# Altium schematic symbol library Debugging Board V1.SCHLIB: 25 symbols
Pins are listed as number, name and electrical type; pins without a type are passive.

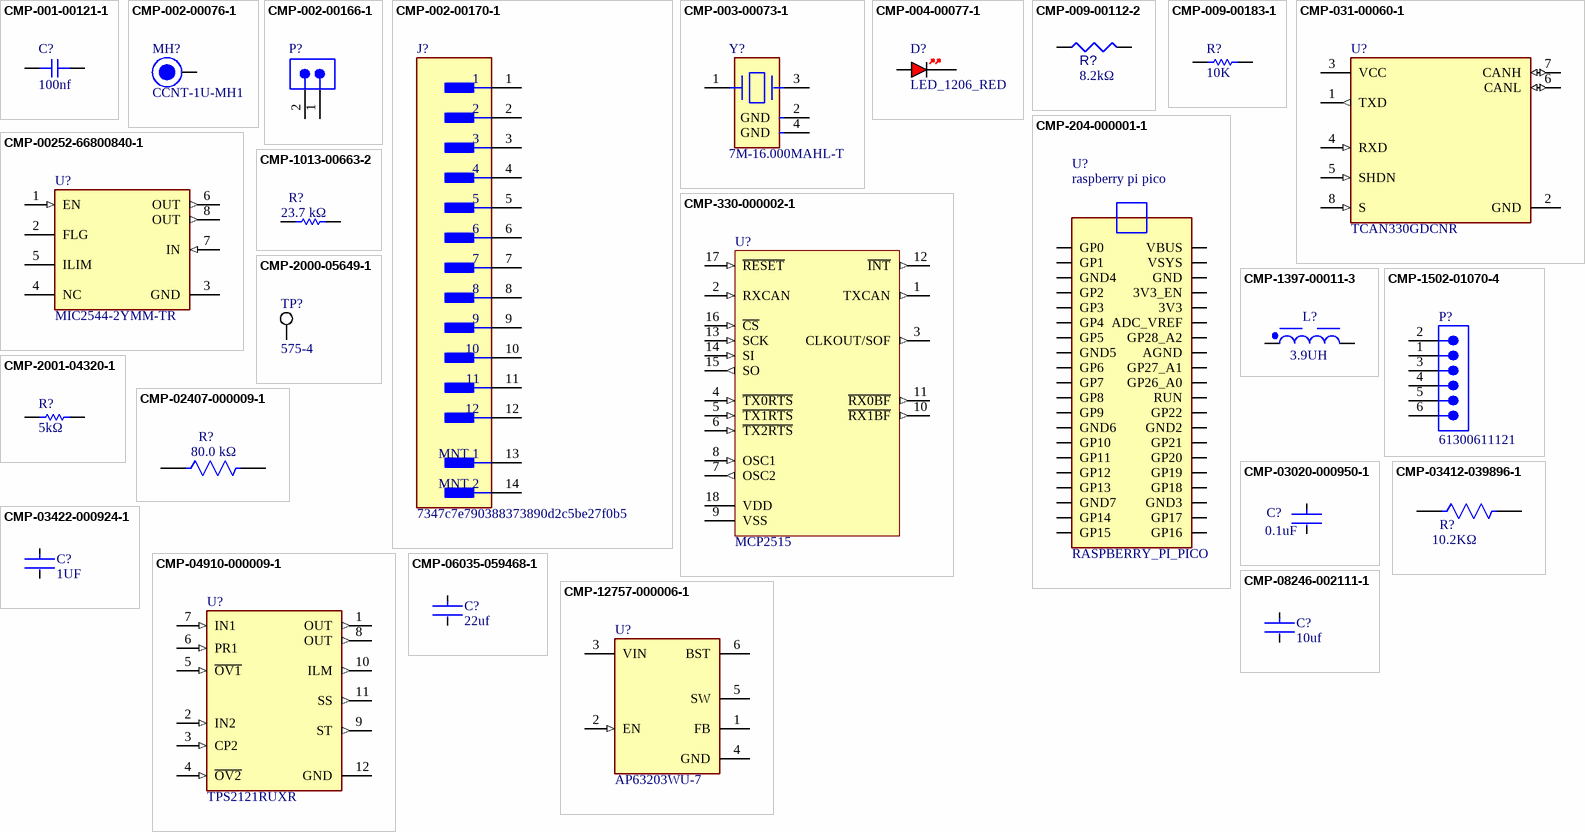
[diagram p0: symbols CMP-001-00121-1 to CMP-12757-000006-1]

## CMP-001-00121-1
designator C?, comment 100nf
Capacitor SMD 0805 - Generic; Source: Generic_Schematic_Library.SchLib; Design Item ID: CAP_0805; Component Type: Capacitors
footprint CAP_0805
pins: 1, 2

## CMP-002-00076-1
designator MH?, comment CCNT-1U-MH1
BOTTOM LEFT Mounting Hole for blank 1U CubeSat template used on CCNT; Component Type: Connectors
footprint CCNT-1U-MH1-Footprint-1
pins: MH1 "Power Ground, Area is connected to the GND network of the main board for heat radiation"

## CMP-002-00166-1
designator P?, comment CMP-1024-00329-1  (value not drawn)
0.025" SQ Post Header, Through-hole, Vertical, -55 to 125 degC, 2.54 mm Pitch, 2-Pin, Male, RoHS; Manufacturer: Samtec; PartNumber: TSW-102-26-F-S; Available Preview Images: 2D; Pitch: 2.54 mm; ComponentLink1URL: http://www.samtec.com; Design Item ID: CMP-1024-00329-1; DatasheetVersion: F-214; Orientation: Vertical; Mounting Technology: Through-hole; ComponentLink2URL: http://www.samtec.com/documents/webfiles/pdf/TSW_TH.PDF; ComponentLink3URL: http://www.samtec.com/documents/webfiles/cpdf/TSW-XXX-XX-XXX-X-XX-XXX-MKT.pdf; ComponentLink2Description: Datasheet; Source: SquidSat Deployable Antenna REV1_1.SCHLIB; ComponentLink3Description: Package Specification; RoHS: True; Temperature Range: -55 to 125 degC; PackageVersion: DM, 8/1988; PackageReference: TSW-102-26-XX-S; PackageDescription: .025[0.64] SQ. Post Terminal Strip Assembly; ComponentLink1Description: Manufacturer URL; Component Type: Connectors
footprint SMTC-TSW-102-26-XX-S (.025 SQ Post Terminal Strip Assembly, 1x2 Pins, Vertical, 2.54mm Pitch, Male)
pins: 1, 2

## CMP-002-00170-1
designator J?, comment 7347c7e790388373890d2c5be27f0b5
CONN HEADER SMD 12POS 1.25MM; Current Rating: 1A; Number Of Contacts: 12; Voltage Rating (AC): 50V; Wire/Cable Gauge: 26AWG; Orientation: Straight; Reach SVHC Compliant: Yes; Contact Material: Bronze; Source: SquidSat Deployable Antenna REV1_1.SCHLIB; Packaging: Cut Tape; Termination: SMD/SMT; Number of Rows: 1; Min Operating Temperature: -25°C; Mount: Surface Mount; Pitch: 1.25mm; Housing Material: Nylon; Number of Positions: 12; Voltage Rating: 50V; Housing Color: Natural; Max Operating Temperature: 85°C; Lead Free: Lead Free; Contact Plating: Tin; Series: GH; Design Item ID: 7347c7e790388373890d2c5be27f0b5; Component Type: Connectors
footprint FP-BM12B-GHS-TBT_LF_SN-MFG
pins: 1, 2, 3, 4, 5, 6, 7, 8, 9, 10, 11, 12, 13 MNT 1, 14 MNT 2

## CMP-003-00073-1
designator Y?, comment 7M-16.000MAHL-T
Crystal 16MHz, 30ppm, 22pF, 60O; ESR (Equivalent Series Resistance): 80; Pins: 4; Component Type: Standard; Min Operating Temperature: -40°C; Frequency: 16MHz; Frequency Stability: 30ppm; Max Operating Temperature: 85°C; Frequency Tolerance: 30ppm; Load Capacitance: 22pF; Design Item ID: CMP-18717-000072-1; Source: Squid FCR V0.SCHLIB; Component Type: Crystals & Oscillators
footprint FP-7M-MFG
pins: 1, 2 GND (power), 3, 4 GND (power)

## CMP-004-00077-1
designator D?, comment LED_1206_RED
LED 1206 RED SMD; Manufacturer: Wurth Elektronik; Manufacturer Part Number: 150120SS75000; Source: Generic_Schematic_Library.SchLib; Design Item ID: LED_1206_RED; Component Type: Diodes
footprint LED_1206_RED
pins: A, K

## CMP-009-00112-2
designator R?, comment value 8.2kΩ  (hidden comment: 8D2R2J)
8R2 0.063W 5% 0402 (1005 Metric)  SMD / RC0805FR-078K2L; Power: 63mW; Pins: 2; Mounting Technology: SMT; Tolerance: 5%; Case/Package: 0402; Component Type: Resistors
footprint RESC0402(1005)_L (Chip Resistor, Body 1.0x0.5mm, IPC High Density)
pins: 1, 2
1 alternate drawing of the same symbol

## CMP-009-00183-1
designator R?, comment 10K
Resistor SMD 0805 - Generic; Source: Generic_Schematic_Library.SchLib; Design Item ID: RES_0805; Component Type: Resistors
footprint RES_0805
pins: 1, 2

## CMP-031-00060-1
designator U?, comment TCAN330GDCNR
IC TRANSCEIVER 1/1 SOT23-8; Data Rate: 1Mbps; Lead Free: Lead Free; Pin Count: 8; Mount: Surface Mount; Min Operating Temperature: -40°C; Packaging: Tape and Reel; Case/Package: SOT-23-8; Source: Squid FCR V0.SCHLIB; Component Type: Standard; Max Operating Temperature: 125°C; Design Item ID: CMP-04872-000178-1; RoHS Compliant: Yes; Component Type: Integrated Circuits
footprint FP-DCN0008A-MFG
pins: 1 TXD (out), 2 GND (power), 3 VCC (power), 4 RXD (in), 5 SHDN (in), 6 CANL (io), 7 CANH (io), 8 S (in)

## CMP-204-000001-1
designator U?, comment RASPBERRY_PI_PICO
Raspberry Pi Board, Arm Cortex-M0+; Core Architecture:Arm; Core Sub-Architecture:Cortex-M0+; Kit Contents:Raspberry Pi Pico Board; No. Of Bits:32Bit; Silicon Core Number:Rp2040; Silicon Manufacturer:Raspberry Pi; Value: U*; Component Type: Standard; Pin Count: 40; Design Item ID: RASPBERRY_PI_PICO; Source: RASPBERRY_PI_PICO.SchLib; MP: RASPBERRY PI PICO; Package: None; MF: Raspberry Pi; SnapEDA_Link: https://www.snapeda.com/parts/RASPBERRY%20PI%20PICO/Raspberry+Pi/view-part/?ref=snap; Check_prices: https://www.snapeda.com/parts/RASPBERRY%20PI%20PICO/Raspberry+Pi/view-part/?ref=eda; Component Type: Integrated Circuits
footprint RASPBERRY_PI_PICO
pins: 3V3 (io), 3V3_EN (io), ADC_VREF (io), AGND (io), GND (io), GND2 (io), GND3 (io), GND4 (io), GND5 (io), GND6 (io), GND7 (io), GP0 (io), GP1 (io), GP2 (io), GP3 (io), GP4 (io), GP5 (io), GP6 (io), GP7 (io), GP8 (io), GP9 (io), GP10 (io), GP11 (io), GP12 (io), GP13 (io), GP14 (io), GP15 (io), GP16 (io), GP17 (io), GP18 (io), GP19 (io), GP20 (io), GP21 (io), GP22 (io), GP26_A0 (io), GP27_A1 (io), GP28_A2 (io), RUN (io), VBUS (io), VSYS (io)
text: raspberry pi pico

## CMP-00252-66800840-1
designator U?, comment MIC2544-2YMM-TR
MIC2544-2YMM-TR Current Limit Switch Single 2.7V to 5.5V 1.5A 8-Pin MSOP T/R - Tape and Reel; NexarPartId: 66800840; Fault Protection: Over Temperature; Output Configuration: High Side; Number of Outputs: 1; Interface: On/Off; Resistance: 120MΩ; RoHS: Compliant; Packaging: Cut Tape; Mount: Surface Mount; Min Operating Temperature: -40°C; Current Rating: 1.5A; Max Operating Temperature: 85°C; Number of Pins: 8; Lifecycle Status: Production; Nominal Input Voltage: 5.5V; Lead Free: Lead Free; Radiation Hardening: No; Max Supply Voltage: 5.5V; Schedule B: 8542390000; Operating Supply Voltage: 5.5V; Case/Package: MSOP; Max Output Current: 1.5A
footprint FP-MSOP-8LD-PL-1-MFG (MOSFET and Power Driver 1.5A 2-OUT Low Side Non-Inverting 8-Pin MSOP Tube - Rail/Tube)
footprint FP-MSOP-8LD-PL-1-IPC_A (MOSFET and Power Driver 1.5A 2-OUT Low Side Non-Inverting 8-Pin MSOP Tube - Rail/Tube)
footprint FP-MSOP-8LD-PL-1-IPC_B (MOSFET and Power Driver 1.5A 2-OUT Low Side Non-Inverting 8-Pin MSOP Tube - Rail/Tube)
footprint FP-MSOP-8LD-PL-1-IPC_C (MOSFET and Power Driver 1.5A 2-OUT Low Side Non-Inverting 8-Pin MSOP Tube - Rail/Tube)
pins: 1 EN (in), 2 FLG, 3 GND (power), 4 NC, 5 ILIM, 6 OUT (out), 7 IN (in), 8 OUT (out)

## CMP-330-000002-1
designator U?, comment MCP2515
Stand-Alone CAN Controller With SPI Interface, 18-Pin SOIC, Extended Temperature; Design Item ID: CMP-0186-00035-2; ComponentLink1Description: Manufacturer URL; PackageDescription: 18-Lead Plastic Small Outline (SO) - Wide 7.50mm Body [SOIC]; Code_JEDEC: MS-013; PackageVersion: revBB, Aug-2009; Source: Squid FCR V0.SCHLIB; ComponentLink3URL: http://www.microchip.com/stellent/groups/techpub_sg/documents/packagingspec/en012702.pdf; DatasheetVersion: revF, Oct-2010; RevisionNote: URLs added. DatasheetVersion updated.; Component Type: Standard; Pin Count: 18; ComponentLink2URL: http://ww1.microchip.com/downloads/en/DeviceDoc/21801f.pdf; ComponentLink3Description: Package Specification; ComponentLink1URL: http://www.microchip.com/; PackageReference: SOIC-SO18; ComponentLink2Description: Datasheet
footprint SOIC-SO18_M
pins: 1 TXCAN (out), 2 RXCAN (in), 3 CLKOUT/SOF (out), 4 ~{TX0RTS} (in), 5 ~{TX1RTS} (in), 6 ~{TX2RTS} (in), 7 OSC2 (out), 8 OSC1 (in), 9 VSS (power), 10 ~{RX1BF} (out), 11 ~{RX0BF} (out), 12 ~{INT} (out), 13 SCK (in), 14 SI (in), 15 SO (out), 16 ~{CS} (in), 17 ~{RESET} (in), 18 VDD (power)

## CMP-1013-00663-2
designator R?, comment 23.7 kΩ
RC0805FR-0723K7L; Manufacturer: Yageo; Part Number: RC0805FR-0723K7L
footprint RESC2013X60X35NL10T20 (Chip Resistor, 2-Leads, Body 2.00x1.25mm, IPC Medium Density)
footprint RESC2013X60X35ML10T20 (Chip Resistor, 2-Leads, Body 2.00x1.25mm, IPC Low Density)
footprint RESC2013X60X35LL10T20 (Chip Resistor, 2-Leads, Body 2.00x1.25mm, IPC High Density)
pins: 1, 2
1 alternate drawing of the same symbol

## CMP-1397-00011-3
designator L?, comment 3.9UH
Fixed Ind 3.9UH 3.8A 20 Mohm SMD; Core Material: Composite, Ferrite; Inductance: 3.9µH; Series Resistance: 16.7mΩ; Tolerance: 30%; Test Frequency: 100kHz; Shielding: Shielded; Self Resonant Frequency: 45MHz; Saturation Current: 4A; Number of Pins: 2; Max Operating Temperature: 125°C; Mount: Surface Mount; Length: 7.8mm; DC Resistance (DCR): 16.7mΩ; Case/Package: SMD/SMT; Min Operating Temperature: -40°C; Width: 7mm; REACH SVHC: Unknown; RMS Current (Irms): 3.8A; Max DC Current: 3.8A; Composition: Wirewound; Termination: SMD/SMT; Inductance Tolerance: 30%; Ambient Temperature Range High: 85°C; Ambient Temperature Range Low: -40°C; Depth: 7mm; Height - Seated (Max): 4.4958mm; RoHS: Compliant; Height: 4.8mm; Current Rating: 3.8A
footprint WE-PD2SR_7850 (Inductor, 1.2UH, 4.85A, 30%, Pwr, 110MHZ)
pins: 1, 2

## CMP-1502-01070-4
designator P?, comment 61300611121
THT Vertical Pin Header WR-PHD, Pitch 2.54 mm, Single Row, 6 pins; Pitch: 2.54mm; Operating Supply Voltage: 250V; Connector Type: Male Pin; Gender: Male; Number of Positions: 6; Contact Resistance: 20mΩ; Current Rating: 3A; Termination: Through Hole; Color: Black; Number of Pins: 6; Lead Pitch: 2.54mm; Height: 8.89mm; RoHS: Compliant; Lead Free: Lead Free; Contact Mating Length: 5.9944mm; Contact Plating: Gold; Contact Gender: Male; Packaging: Bulk; Orientation: Vertical; Mount: Through Hole; Voltage Rating: 250V; Number of Rows: 1; Max Operating Temperature: 105°C; Min Operating Temperature: -40°C; Housing Material: PBT; Contact Material: Gold; Number of Contacts: 6
footprint 61300611121 (THT Vertical Pin Header WR-PHD, Pitch 2.54 mm, Single Row, 6 pins)
pins: 1, 2, 3, 4, 5, 6

## CMP-2000-05649-1
designator TP?, comment 575-4
Banana Jack, Non-Insulated, 1-Pin THD, RoHS, Bulk; Manufacturer: Keystone-Electronics; Package Version: Rev. B, 11/1994; Plug/Mating Plug Diameter: StandardBanana; Gender: Female; Package Reference: 575-4; Operating Temperature: -; Contact Material: Brass; Packaging: Bulk; Series: -; Category: Connectors,Interconnects; Color: -; Type: BananaJack; Contact Finish: Nickel; Features: -; Family: BananaandTipConnectors-Jacks,Plugs; Body Material: -; Manufacturer URL: http://www.keyelco.com/; Termination: Solder; Insulation: Non-Insulated; Datasheet Version: Rev. B, 11/1994; Mounting Technology: ThroughHole; Package URL: http://www.keyelco.com/product-pdf.cfm?p=2379; Mounting Type: ThroughHole; Package Description: 1-Pin Through Hole Device, Dia 7.92 mm; Datasheet URL: http://www.keyelco.com/product-pdf.cfm?p=2379; Wire Gauge: -
footprint KSTN-575-4 (Banana Jack, Non-Insulated, Dia 7.92mm)
pins: 1

## CMP-2001-04320-1
designator R?, comment 5kΩ
PNM0805E5001BST5; Manufacturer: Vishay Dale; Part Number: PNM0805E5001BST5
footprint RESC2013X83X38NL15T13 (Chip Resistor, 2-Leads, Body 2.03x1.27mm, IPC Medium Density)
footprint RESC2013X83X38LL15T13 (Chip Resistor, 2-Leads, Body 2.03x1.27mm, IPC High Density)
footprint RESC2013X83X38ML15T13 (Chip Resistor, 2-Leads, Body 2.03x1.27mm, IPC Low Density)
pins: 1, 2
1 alternate drawing of the same symbol

## CMP-02407-000009-1
designator R?, comment 80.0 kΩ
RES 80K OHM 0.1% 0.15W 0603 / PTN0603E8002BST1; Manufacturer: Vishay; Value: 80kΩ; Voltage Rating: 75V; Temperature Coefficient: 25ppm/°C; Power Rating: 150mW; Device Class L1: Passive Components; Device Class L2: Resistors; Footprint Url: https://www.vishay.com/docs/60119/landpatterns.pdf; RoHS: TRUE; Resistance: 80kΩ; Lead Free: Yes; Category: Res; Automotive: No; Tolerance: 0.1%; ComponentLink2URL: https://www.vishay.com/docs/60026/ptn.pdf; Device Class L3: Chip SMD Resistors; Series: PTN; Octopart: https://octopart.com/ptn0603e8002bst1-vishay-44224719; Height: 0.02inch; Composition: Thin Film; Digikey Description: RES 80K OHM 0.1% 0.15W 0603; Temperature Range Low: -55°C; Temperature Range High: +155°C; Manufacturer Part Number: PTN0603E8002BST1; ComponentLink2Description: Datasheet; Ipc Land Pattern Name: RESC16381X51; Package: PTN0603; Temperature: -55°C to +155°C
footprint FP-PTN0603-MFG
footprint FP-PTN0603-IPC_C
footprint FP-PTN0603-IPC_B
footprint FP-PTN0603-IPC_A
pins: 1, 2

## CMP-03020-000950-1
designator C?, comment 0.1uF
CAP CER 0.1UF 50V X7R 0805; Manufacturer: KEMET; Manufacturer Part Number: C0805C104J5RACTU; Temperature Coefficient: 30ppm/°C; Value: 0.10 μF; Material: Ceramic; Tolerance: 0.05; Voltage Rating: 50 V; Digikey Description: CAP CER 0.1UF 50V X7R 0805; Octopart: https://octopart.com/c0805c104j5ractu-kemet-104634; RoHS: TRUE; Device Class L1: Passive Components; Temperature Characteristic: X7R; Device Class L3: Ceramic Capacitors; Lead Free: Yes; Automotive: No; Category: Cap; Temperature: -55°C to +125°C; Package: C0805C-DN; Temperature Range High: +125°C; Height: 0.88mm; Capacitance: 0.10 μF; Temperature Range Low: -55°C; ComponentLink2Description: Datasheet; ComponentLink2URL: https://content.kemet.com/datasheets/KEM_C1003_C0G_SMD.pdf; Ipc Land Pattern Name: CAPC200125X78; Device Class L2: Capacitors; Mouser Description: Multilayer Ceramic Capacitors MLCC - SMD/SMT 50volts 0.1uF X7R 5%
footprint FP-C0805C-DN-MFG
footprint FP-C0805C-DN-IPC_C
footprint FP-C0805C-DN-IPC_B
footprint FP-C0805C-DN-IPC_A
pins: 1, 2

## CMP-03412-039896-1
designator R?, comment 10.2KΩ
RES 10.2KΩ 1.00% 0.1W 0603 / AC0603FR-1310K2L; RoHS Compliant: Yes
footprint FP-AC0603-IPC_B
footprint FP-AC0603-IPC_A
footprint FP-AC0603-IPC_C
footprint FP-AC0603-MFG
pins: 1, 2

## CMP-03422-000924-1
designator C?, comment 1UF
CAP CER 1UF 16V X7R 0603 / CC0603KRX7R7BB105; Manufacturer: YAGEO; Tolerance: 0.1; Description: CC0603 1 uF X7R 10.00% 16 V; Temperature Coefficient: 15%; Material: Ceramic; Package: CC0603-DA; RoHS: TRUE; Device Class L2: Capacitors; Temperature Characteristic: X7R; Temperature: -55°C to +125°C; Temperature Range Low: -55°C; Automotive: No; ComponentLink2Description: Datasheet; Value: 1 uF; Lead Free: Yes; Capacitance: 1 uF; ComponentLink2URL: http://www.yageo.com/documents/recent/UPY-GPHC_X7R_6.3V-to-50V_18.pdf; Device Class L1: Passive Components; Voltage: 16 V; Octopart: https://octopart.com/cc0603krx7r7bb105-yageo-42271928; Category: Cap; Digikey Description: CAP CER 1UF 16V X7R 0603; Footprint Url: http://www.yageo.com/exep/pages/download/literatures/UPY-C_GEN_24.pdf; Height: 0.9mm; Manufacturer Part Number: CC0603KRX7R7BB105; Voltage Rating: 16 V; Temperature Range High: +125°C; Mouser Description: Multilayer Ceramic Capacitor, CC Series, 1 - F, - 10%, X7R, 16 V, 0603 [1608 Metric]; Device Class L3: Ceramic Capacitors
footprint FP-CC0603-DA-MFG
footprint FP-CC0603-DA-IPC_C
footprint FP-CC0603-DA-IPC_B
footprint FP-CC0603-DA-IPC_A
pins: 1, 2

## CMP-04910-000009-1
designator U?, comment TPS2121RUXR
PWR MGMT BATTERY MGMT. for Stack / PSU / USB source selection; Manufacturer: Texas Instruments; Min Supply Voltage: 2.8V; Max Junction Temp: +125°C; Output Voltage: 22V; Output Current: 1.5-5.2A; Standoff Height: 0mm; Number Of Outputs: 1; Nominal Supply Current: 300uA; Device Class L2: Power Management ICs; Octopart: https://octopart.com/tps2121ruxr-texas+instruments-95511053; Mouser Description: 2.7-22V, 56m?, 4.5A, Priority Power MUX with Seamless Switchover 12-VQFN-HR -40 to 125; Lead Free: Yes; Digikey Description: PWR MGMT BATTERY MGMT; Manufacturer Part Number: TPS2121RUXR; Height: 1mm; Device Class L1: Integrated Circuits (ICs); Category: IC; Max Supply Voltage: 22V; ComponentLink2Description: Datasheet; Temperature: -40°C to +125°C; Temperature Range High: +125°C; ComponentLink2URL: https://www.ti.com/lit/ds/symlink/tps2121.pdf; Automotive: No; Package: RUX0012A; RoHS: TRUE; Device Class L3: unset; Temperature Range Low: -40°C
footprint FP-RUX0012A-MFG
pins: 1 OUT (out), 2 IN2 (in), 3 CP2 (in), 4 ~{OV2} (in), 5 ~{OV1} (in), 6 PR1 (in), 7 IN1 (in), 8 OUT (out), 9 ST (out), 10 ILM (out), 11 SS (out), 12 GND (power)

## CMP-06035-059468-1
designator C?, comment 22uf
Ceramic Capacitor for Automotive 22uF ±10% 10VDC X7R 1206 Embossed T/R
footprint FP-GCM31C-0_2-e0_3_0_8-IPC_A
footprint FP-GCM31C-0_2-e0_3_0_8-MFG
footprint FP-GCM31C-0_2-e0_3_0_8-IPC_C
footprint FP-GCM31C-0_2-e0_3_0_8-IPC_B
pins: 1, 2

## CMP-08246-002111-1
designator C?, comment 10uf
Cap Ceramic 10uF 35V X7R 10% Pad SMD 1206 +125°C Automotive T/R; Height: 1.6mm; Thickness: 0.075inch; Tolerance: 10%; Voltage Rating (DC): 35V; Min Operating Temperature: -55°C; Width: 0.063inch; Ratings: AEC-Q200; Dielectric: X7R; Voltage Rating: 35V; REACH SVHC: No SVHC; Case Code (Imperial): 1206; Features: Soft Termination; Mount: Surface Mount; Case Code (Metric): 3216; Lead Free: Lead Free; Length: 0.126inch; Package Quantity: 2000; Packaging: Tape and Reel; Case/Package: 1206; Capacitance: 10uF; Max Operating Temperature: 125°C; Weight: 0.000571oz; Termination: SMD/SMT
footprint FP-CGA5L-0_3-0_1-IPC_A
footprint FP-CGA5L-0_3-0_1-MFG
footprint FP-CGA5L-0_3-0_1-IPC_B
footprint FP-CGA5L-0_3-0_1-IPC_C
pins: 1, 2

## CMP-12757-000006-1
designator U?, comment AP63203WU-7
IC REG BUCK 3.3V 2A TSOT26; Manufacturer: Diodes Inc.; Output Type: Fixed; Min Supply Voltage: 3.8V; Number Of Outputs: 1; Max Junction Temp: +160°C; Nominal Supply Current: 22uA; Standoff Height: 0.01mm; Switching Frequency: 1.1MHz; Max Supply Voltage: 32V; ComponentLink2Description: Datasheet; Device Class L1: Integrated Circuits (ICs); Temperature: to +160°C; Device Class L3: Voltage Regulators - Switching; RoHS: TRUE; Octopart: https://octopart.com/ap63203wu-7-diodes+inc.-98099550; Output Voltage: 3.3V; Lead Free: Yes; ComponentLink2URL: https://www.diodes.com/assets/Datasheets/AP63200-AP63201-AP63203-AP63205.pdf; Digikey Description: IC REG BUCK 3.3V 2A TSOT26; Footprint Url: https://www.diodes.com/assets/Package-Files/TSOT26.pdf; Ambient Temperature Range High: +85°C; Height: 1mm; Automotive: No; Temperature Range High: +160°C; Switching Topology: Buck; Output Current: 2A; Package: TSOT26; Category: IC; Mouser Description: AP63203 Series 3.3 V 2 A SMT Fixed Low IQ Synchronous Buck - TSOT-26; Device Class L2: Power Management ICs; Ambient Temperature Range Low: -40°C; Manufacturer Part Number: AP63203WU-7
footprint FP-TSOT26-MFG
footprint FP-TSOT26-IPC_C
footprint FP-TSOT26-IPC_B
footprint FP-TSOT26-IPC_A
pins: 1 FB, 2 EN (in), 3 VIN (power), 4 GND (power), 5 SW, 6 BST